# Altium footprint library AD.PcbLib: 13 footprints
Each footprint in its own frame and in the unit in brackets; x right, y up, seen from the top. Pads: shape width x height; smd on the part's side, far side on the other; paste and mask are expansions set on the pad; w line width, h text height; cw(c..) or ccw(c..) is an arc to the next point about the centre after c.
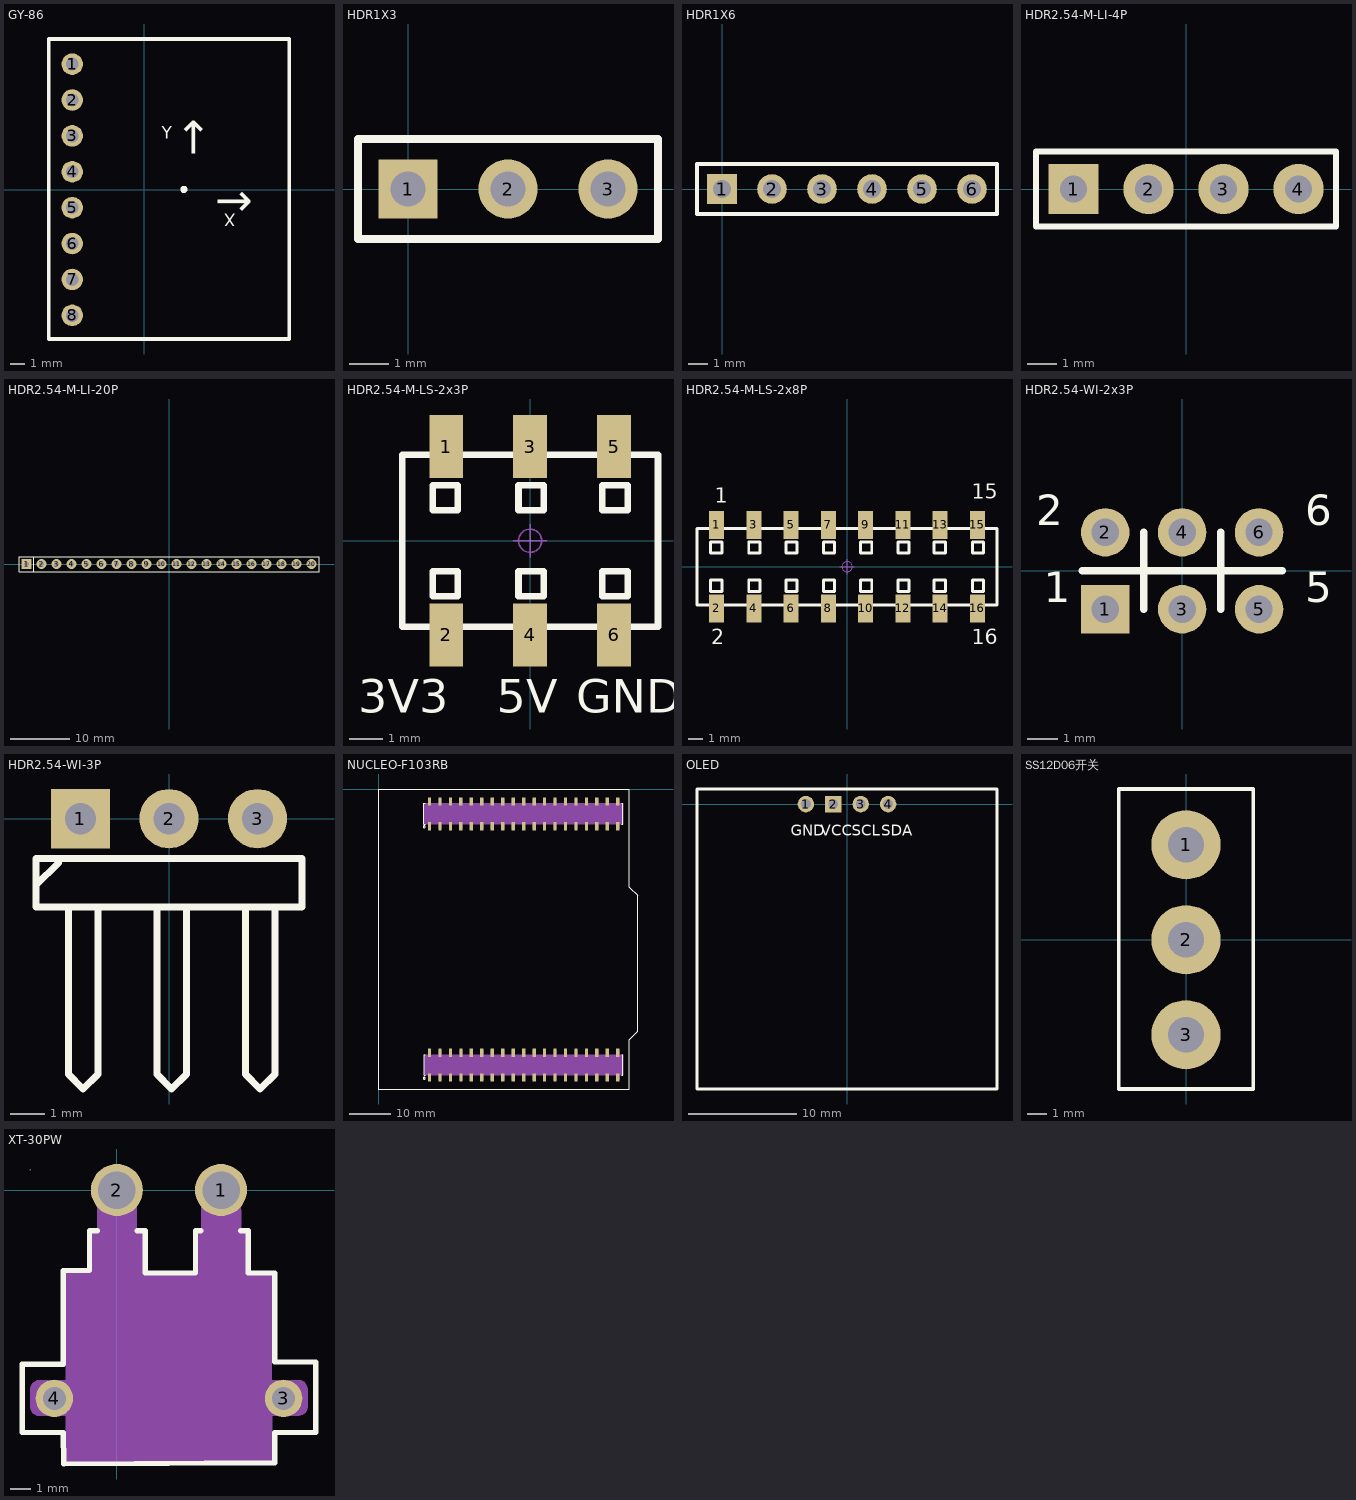
[diagram p0: the footprints below, top view; thin cyan lines are the x and y axes]

## GY-86 [mil]
pads (8):
  round 60 hole 36: 1(-200,350) 2(-200,250) 3(-200,150) 4(-200,50) 5(-200,-50) 6(-200,-150) 7(-200,-250) 8(-200,-350)
Top Overlay:
  circle w10: c111,1 r5
  lines w10: 404.29,420 404.29,-415.98 -265,-415.98 -265,420.01 404.29,420 ; 404.29,420 404.29,420
  text "↑" at 175.05,19.78 h157.48
  text "X" at 255.05,-54 h59.05
  text "↑" at 85.05,69.78 h157.48
  text "Y" at 50.05,129.78 h59.05

## HDR1X3 [mm] "Connector; Header; 3 Position"
pads (3):
  rect 1.5x1.5 hole 0.9: 1(0,0)
  round 1.5 hole 0.9: 2(2.54,0) 3(5.08,0)
Top Overlay:
  lines w0.2: -1.27,-1.27 6.35,-1.27 6.35,1.27 -1.27,1.27 -1.27,-1.27
3D body "HDR2.54-1P_M.STEP": height 8.5, standoff -3, extent 3.81,-1.27 6.35,1.27
3D body "HDR2.54-1P_M.STEP": height 8.5, standoff -3, extent 1.27,-1.27 3.81,1.27
3D body "HDR2.54-1P_M.STEP": height 8.5, standoff -3, extent -1.27,-1.27 1.27,1.27

## HDR1X6 [mm] "Connector; Header; 6 Position"
pads (6):
  rect 1.5x1.5 hole 0.9: 1(0,0)
  round 1.5 hole 0.9: 2(2.54,0) 3(5.08,0) 4(7.62,0) 5(10.16,0) 6(12.7,0)
Top Overlay:
  lines w0.2: -1.27,-1.27 -1.27,1.27 13.97,1.27 13.97,-1.27 -1.27,-1.27
3D body "HDR2.54-1P_M.STEP": height 8.5, standoff -3, extent 11.43,-1.27 13.97,1.27
3D body "HDR2.54-1P_M.STEP": height 8.5, standoff -3, extent 8.89,-1.27 11.43,1.27
3D body "HDR2.54-1P_M.STEP": height 8.5, standoff -3, extent 6.35,-1.27 8.89,1.27
3D body "HDR2.54-1P_M.STEP": height 8.5, standoff -3, extent 3.81,-1.27 6.35,1.27
3D body "HDR2.54-1P_M.STEP": height 8.5, standoff -3, extent 1.27,-1.27 3.81,1.27
3D body "HDR2.54-1P_M.STEP": height 8.5, standoff -3, extent -1.27,-1.27 1.27,1.27

## HDR2.54-M-LI-4P [mm] "排母，4脚"
pads (4):
  rect 1.7x1.7 hole 0.9: 1(-3.81,0)
  round 1.7 hole 0.9: 2(-1.27,0) 3(1.27,0) 4(3.81,0)
Top Overlay:
  lines w0.2: -5.08,-1.27 5.08,-1.27 5.08,1.27 -5.08,1.27 -5.08,-1.27
3D body "HDR2.54-1P_M.STEP": height 8.5, standoff -3, extent 0,-1.27 2.54,1.27
3D body "HDR2.54-1P_M.STEP": height 8.5, standoff -3, extent 2.54,-1.27 5.08,1.27
3D body "HDR2.54-1P_M.STEP": height 8.5, standoff -3, extent -2.54,-1.27 0,1.27
3D body "HDR2.54-1P_M.STEP": height 8.5, standoff -3, extent -5.08,-1.27 -2.54,1.27

## HDR2.54-M-LI-20P [mm] "排母，20脚"
pads (20):
  rect 1.7x1.7 hole 0.9: 1(-24.13,0)
  round 1.7 hole 0.9: 2(-21.59,0) 3(-19.05,0) 4(-16.51,0) 5(-13.97,0) 6(-11.43,0) 7(-8.89,0) 8(-6.35,0) 9(-3.81,0) 10(-1.27,0) 11(1.27,0) 12(3.81,0) 13(6.35,0) 14(8.89,0) 15(11.43,0) 16(13.97,0)
  round 1.7 hole 0.762: 17(16.51,0) 18(19.05,0) 19(21.59,0) 20(24.13,0)
Top Overlay:
  lines w0.2: -22.88,-1.25 -22.88,1.25 ; -25.4,-1.27 25.4,-1.27 25.4,1.27 -23.495,1.27 -25.4,1.27 -25.4,-1.27
3D body "HDR2.54-1P_M.STEP": height 8.5, standoff -3, extent -15.24,-1.27 -12.7,1.27
3D body "HDR2.54-1P_M.STEP": height 8.5, standoff -3, extent -17.78,-1.27 -15.24,1.27
3D body "HDR2.54-1P_M.STEP": height 8.5, standoff -3, extent -20.32,-1.27 -17.78,1.27
3D body "HDR2.54-1P_M.STEP": height 8.5, standoff -3, extent -22.86,-1.27 -20.32,1.27
3D body "HDR2.54-1P_M.STEP": height 8.5, standoff -3, extent -25.4,-1.27 -22.86,1.27
3D body "HDR2.54-1P_M.STEP": height 8.5, standoff -3, extent -2.54,-1.27 0,1.27
3D body "HDR2.54-1P_M.STEP": height 8.5, standoff -3, extent -5.08,-1.27 -2.54,1.27
3D body "HDR2.54-1P_M.STEP": height 8.5, standoff -3, extent -7.62,-1.27 -5.08,1.27
3D body "HDR2.54-1P_M.STEP": height 8.5, standoff -3, extent -10.16,-1.27 -7.62,1.27
3D body "HDR2.54-1P_M.STEP": height 8.5, standoff -3, extent -12.7,-1.27 -10.16,1.27
3D body "HDR2.54-1P_M.STEP": height 8.5, standoff -3, extent 10.16,-1.27 12.7,1.27
3D body "HDR2.54-1P_M.STEP": height 8.5, standoff -3, extent 7.62,-1.27 10.16,1.27
3D body "HDR2.54-1P_M.STEP": height 8.5, standoff -3, extent 5.08,-1.27 7.62,1.27
3D body "HDR2.54-1P_M.STEP": height 8.5, standoff -3, extent 2.54,-1.27 5.08,1.27
3D body "HDR2.54-1P_M.STEP": height 8.5, standoff -3, extent 0,-1.27 2.54,1.27
3D body "HDR2.54-1P_M.STEP": height 8.5, standoff -3, extent 22.86,-1.27 25.4,1.27
3D body "HDR2.54-1P_M.STEP": height 8.5, standoff -3, extent 20.32,-1.27 22.86,1.27
3D body "HDR2.54-1P_M.STEP": height 8.5, standoff -3, extent 17.78,-1.27 20.32,1.27
3D body "HDR2.54-1P_M.STEP": height 8.5, standoff -3, extent 15.24,-1.27 17.78,1.27
3D body "HDR2.54-1P_M.STEP": height 8.5, standoff -3, extent 12.7,-1.27 15.24,1.27

## HDR2.54-M-LS-2x3P [mm] "脚距：2.54mm，贴片双排母"
pads (6):
  rect 1.02x1.9 smd: 1(-2.54,2.85) 2(-2.54,-2.85) 3(0,2.85) 4(0,-2.85) 5(2.54,2.85) 6(2.54,-2.85)
Top Overlay:
  lines w0.2: -3.87,-2.6 -3.87,2.6 3.87,2.6 3.87,-2.6 -3.87,-2.6 ; -2.951,-1.681 -2.951,-0.919 -2.189,-0.919 -2.189,-1.681 -2.951,-1.681 ; -2.951,0.919 -2.951,1.681 -2.189,1.681 -2.189,0.919 -2.951,0.919 ; -0.351,-1.681 -0.351,-0.919 0.411,-0.919 0.411,-1.681 -0.351,-1.681 ; -0.351,0.919 -0.351,1.681 0.411,1.681 0.411,0.919 -0.351,0.919 ; 2.189,-1.681 2.951,-1.681 2.951,-0.919 2.189,-0.919 2.189,-1.681 ; 2.189,0.919 2.951,0.919 2.951,1.681 2.189,1.681 2.189,0.919
  text "GND" at 1.397,-5.207 h1.02
  text "3V3" at -5.207,-5.207 h1.02
  text "5V" at -1.016,-5.207 h1.02
Top Courtyard:
  circle w0.05: c0,0 r0.35
  lines w0.05: -0.5,0 0.5,0 ; 0,-0.5 0,0.5
3D body "HDR2.54 2x1P_M.STEP": height 5.15, standoff 0, extent 1.24,-3.2 3.84,3.2
3D body "HDR2.54 2x1P_M.STEP": height 5.15, standoff 0, extent -1.3,-3.2 1.3,3.2
3D body "HDR2.54 2x1P_M.STEP": height 5.15, standoff 0, extent -3.84,-3.2 -1.24,3.2

## HDR2.54-M-LS-2x8P [mm] "脚距：2.54mm，贴片双排母"
pads (16):
  rect 1.02x1.9 smd: 1(-8.89,2.85) 2(-8.89,-2.85) 3(-6.35,2.85) 4(-6.35,-2.85) 5(-3.81,2.85) 6(-3.81,-2.85) 7(-1.27,2.85) 8(-1.27,-2.85) 9(1.27,2.85) 10(1.27,-2.85) 11(3.81,2.85) 12(3.81,-2.85) 13(6.35,2.85) 14(6.35,-2.85) 15(8.89,2.85) 16(8.89,-2.85)
Top Overlay:
  lines w0.2: -10.23,-2.6 10.22,-2.6 10.22,2.6 -10.23,2.6 -10.23,-2.6 ; -9.301,-1.681 -8.539,-1.681 -8.539,-0.919 -9.301,-0.919 -9.301,-1.681 ; -9.301,0.919 -8.539,0.919 -8.539,1.681 -9.301,1.681 -9.301,0.919 ; -6.701,-1.681 -5.939,-1.681 -5.939,-0.919 -6.701,-0.919 -6.701,-1.681 ; -6.701,0.919 -5.939,0.919 -5.939,1.681 -6.701,1.681 -6.701,0.919 ; -4.161,-1.681 -4.161,-0.919 -3.399,-0.919 -3.399,-1.681 -4.161,-1.681 ; -4.161,0.919 -4.161,1.681 -3.399,1.681 -3.399,0.919 -4.161,0.919 ; -1.621,-1.681 -0.859,-1.681 -0.859,-0.919 -1.621,-0.919 -1.621,-1.681 ; -1.621,0.919 -0.859,0.919 -0.859,1.681 -1.621,1.681 -1.621,0.919 ; 0.919,-1.681 1.681,-1.681 1.681,-0.919 0.919,-0.919 0.919,-1.681 ; 0.919,0.919 1.681,0.919 1.681,1.681 0.919,1.681 0.919,0.919 ; 3.459,-1.681 4.221,-1.681 4.221,-0.919 3.459,-0.919 3.459,-1.681 ; 3.459,0.919 4.221,0.919 4.221,1.681 3.459,1.681 3.459,0.919 ; 5.939,-1.681 5.939,-0.919 6.701,-0.919 6.701,-1.681 5.939,-1.681 ; 5.939,0.919 5.939,1.681 6.701,1.681 6.701,0.919 5.939,0.919 ; 8.539,-1.681 8.539,-0.919 9.301,-0.919 9.301,-1.681 8.539,-1.681 ; 8.539,0.919 8.539,1.681 9.301,1.681 9.301,0.919 8.539,0.919
  text "2" at -9.271,-5.278 h1.02
  text "1" at -9.017,4.374 h1.02
  text "15" at 8.509,4.628 h1.02
  text "16" at 8.509,-5.278 h1.02
Top Courtyard:
  circle w0.05: c0,0 r0.35
  lines w0.05: -0.5,0 0.5,0 ; 0,-0.5 0,0.5
3D body "HDR2.54 2x1P_M.STEP": height 5.15, standoff 0, extent 7.59,-3.2 10.19,3.2
3D body "HDR2.54 2x1P_M.STEP": height 5.15, standoff 0, extent 5.05,-3.2 7.65,3.2
3D body "HDR2.54 2x1P_M.STEP": height 5.15, standoff 0, extent 2.51,-3.2 5.11,3.2
3D body "HDR2.54 2x1P_M.STEP": height 5.15, standoff 0, extent -0.03,-3.2 2.57,3.2
3D body "HDR2.54 2x1P_M.STEP": height 5.15, standoff 0, extent -2.57,-3.2 0.03,3.2
3D body "HDR2.54 2x1P_M.STEP": height 5.15, standoff 0, extent -10.19,-3.2 -7.59,3.2
3D body "HDR2.54 2x1P_M.STEP": height 5.15, standoff 0, extent -7.65,-3.2 -5.05,3.2
3D body "HDR2.54 2x1P_M.STEP": height 5.15, standoff 0, extent -5.11,-3.2 -2.51,3.2

## HDR2.54-WI-2x3P [mm] "双排弯脚排针，3x2脚"
pads (6):
  rect 1.6x1.6 hole 0.9: 1(-2.54,-1.27)
  round 1.6 hole 0.9: 2(-2.54,1.27) 3(0,-1.27) 4(0,1.27) 5(2.54,-1.27) 6(2.54,1.27)
Top Overlay:
  lines w0.254: -3.302,0 3.302,0 ; -1.27,-1.27 -1.27,1.27 ; 1.27,-1.27 1.27,1.27
  text "6" at 4.064,1.503 h1.02
  text "5" at 4.064,-1.037 h1.02
  text "2" at -4.826,1.503 h1.02
  text "1" at -4.572,-1.037 h1.02
Bottom Overlay:
  lines w0.254: -3.302,0 3.302,0 ; -1.27,-1.27 -1.27,1.27 ; 1.27,-1.27 1.27,1.27
3D body "HDR-1x2_H.STEP": height 5.1, standoff -3, extent -1.27,-10.489 1.27,2.361
3D body "HDR-1x2_H.STEP": height 5.1, standoff -3, extent -3.81,-10.489 -1.27,2.361
3D body "HDR-1x2_H.STEP": height 5.1, standoff -3, extent 1.27,-10.489 3.81,2.361

## HDR2.54-WI-3P [mm] "弯脚排针，3脚"
pads (3):
  rect 1.7x1.7 hole 0.9: 1(-2.54,0)
  round 1.7 hole 0.9: 2(0,0) 3(2.54,0)
Top Overlay:
  lines w0.2: -3.81,-1.905 -3.175,-1.27 ; -2.888,-2.54 -2.888,-7.332 -2.465,-7.755 -2.041,-7.332 -2.032,-7.323 ; -2.041,-7.323 -2.041,-2.54 ; -0.348,-2.54 -0.348,-7.332 0.075,-7.755 0.499,-7.332 ; 0.499,-7.323 0.499,-2.54 ; 2.192,-2.54 2.192,-7.332 2.615,-7.755 3.039,-7.332 ; 3.039,-7.323 3.039,-2.54 ; -3.81,-2.54 3.81,-2.54 3.81,-1.143 -2.032,-1.143 -3.81,-1.143 -3.81,-2.54
3D body "HDR2.54-1P_H.STEP": height 4.85, standoff -3, extent -3.81,-7.77 -1.27,1.27
3D body "HDR2.54-1P_H.STEP": height 4.85, standoff -3, extent -1.27,-7.77 1.27,1.27
3D body "HDR2.54-1P_H.STEP": height 4.85, standoff -3, extent 1.27,-7.77 3.81,1.27

## NUCLEO-F103RB [mm]
pads (76):
  rect 0.8x2 smd paste+0 mask+0.051: 1(12.366,-70.045) 2(12.366,-64.045) 3(14.906,-70.045) 4(14.906,-64.045) 5(17.446,-70.045) 6(17.446,-64.045) 7(19.986,-70.045) 8(19.986,-64.045) 9(22.526,-70.045) 10(22.526,-64.045) 11(25.066,-70.045) 12(25.066,-64.045) 13(27.606,-70.045) 14(27.606,-64.045) 15(30.146,-70.045) 16(30.146,-64.045) 17(32.686,-70.045) 18(32.686,-64.045) 19(35.226,-70.045) 20(35.226,-64.045) 21(37.766,-70.045) 22(37.766,-64.045) 23(40.306,-70.045) 24(40.306,-64.045) 25(42.846,-70.045) 26(42.846,-64.045) 27(45.386,-70.045) 28(45.386,-64.045) 29(47.926,-70.045) 30(47.926,-64.045) 31(50.466,-70.045) 32(50.466,-64.045) 33(53.006,-70.045) 34(53.006,-64.045) 35(55.546,-70.045) 36(55.546,-64.045) 37(58.086,-70.045) 38(58.086,-64.045) 73(12.361,-9.019) 74(12.361,-3.019) 75(14.901,-9.019) 76(14.901,-3.019) 77(17.441,-9.019) 78(17.441,-3.019) 79(19.981,-9.019) 80(19.981,-3.019) 81(22.521,-9.019) 82(22.521,-3.019) 83(25.061,-9.019) 84(25.061,-3.019) 85(27.601,-9.019) 86(27.601,-3.019) 87(30.141,-9.019) 88(30.141,-3.019) 89(32.681,-9.019) 90(32.681,-3.019) 91(35.221,-9.019) 92(35.221,-3.019) 93(37.761,-9.019) 94(37.761,-3.019) 95(40.301,-9.019) 96(40.301,-3.019) 97(42.841,-9.019) 98(42.841,-3.019) 99(45.381,-9.019) 100(45.381,-3.019) 101(47.921,-9.019) 102(47.921,-3.019) 103(50.461,-9.019) 104(50.461,-3.019) 105(53.001,-9.019) 106(53.001,-3.019) 107(55.541,-9.019) 108(55.541,-3.019) 109(58.081,-9.019) 110(58.081,-3.019)
Top Overlay:
  circle w0.254: c11.091,-9.193 r0.231
  circle w0.254: c11.096,-70.22 r0.231
  lines w0.254: 11.283,-3.519 11.021,-3.519 11.021,-8.519 11.309,-8.519 ; 11.328,-64.545 11.026,-64.545 11.026,-69.545 11.354,-69.545 ; 59.03,-69.545 59.326,-69.545 59.326,-64.545 59.055,-64.545 ; 59.086,-8.519 59.321,-8.519 59.321,-3.519 59.086,-3.519 ; 62.866,-25.845 62.866,-58.845 60.866,-60.845 60.866,-72.845 -0.025,-72.845 -0.025,0 60.866,0 60.866,-23.845 62.866,-25.845 ; 62.866,-25.845 62.866,-26.045 62.866,-25.845
Mechanical 7:
  region: 11.091,-8.519 11.091,-3.519 59.351,-3.519 59.351,-8.519
  region: 11.096,-69.545 11.096,-64.545 59.356,-64.545 59.356,-69.545
Mechanical 8:
  region: 11.126,-70.615 11.126,-70.627 11.108,-70.645 11.083,-70.645 11.066,-70.627 11.066,-70.615 11.066,-70.602 11.083,-70.585 11.108,-70.585 11.126,-70.602 11.126,-70.615
Top Assembly:
  drawing of 95 lines, arcs and shapes, not listed

## OLED [mil]
pads (4):
  round 60 hole 35.98: 1(-150,0) 3(50,0) 4(150,0)
  rect 60x60 hole 35.98: 2(-50,0)
Top Overlay:
  lines w10: -547.24,-1039.37 547.24,-1039.37 547.24,55.12 -547.24,55.12 -547.24,-1039.37
  text "SDA" at 125,-115.9 h39.37
  text "SCL" at 17.87,-115.9 h39.37
  text "VCC" at -95.37,-115.9 h39.37
  text "GND" at -205,-115.9 h39.37

## SS12D06开关 [mm]
pads (3):
  round 3.5 hole 1.8 paste-2539.97 mask+0.102: 1(0,4.8) 2(0,0) 3(0,-4.8)
Top Overlay:
  lines w0.2: -3.4,-7.544 3.4,-7.544 3.4,7.62 -3.4,7.62 -3.4,-7.544

## XT-30PW [mm]
pads (4):
  round 2.5 hole 1.8 paste-2539.97 mask+0.051: 1(5,0) 2(0,0)
  round 1.8 hole 1.1 paste-2539.97 mask+0.051: 3(8,-10) 4(-3,-10)
Top Overlay:
  lines w0.254: -0.929,-1.952 -1.31,-1.952 -1.31,-3.857 -2.58,-3.857 -2.58,-4.953 -2.58,-8.357 -4.547,-8.357 -4.547,-11.633 -2.577,-11.633 -2.55,-13.15 7.58,-13.091 7.58,-11.633 9.55,-11.633 9.55,-8.255 7.58,-8.255 7.58,-4.953 7.58,-3.984 6.31,-3.984 6.31,-1.952 5.929,-1.952 ; 0.976,-1.952 1.357,-1.952 1.357,-3.984 3.77,-3.984 3.77,-1.952 4.024,-1.952
Mechanical 7:
  region: -0.805,0.543 -0.687,0.665 -0.584,0.774 -0.447,0.858 -0.31,0.919 -0.165,0.963 0.011,0.97 0.152,0.959 0.305,0.919 0.454,0.856 0.586,0.769 0.697,0.66 0.805,0.535 0.873,0.391 0.92,0.246 0.952,0.098 0.95,-1.981 1.251,-1.981 1.25,-3.982 3.756,-3.979 3.751,-1.981 4.053,-1.978 4.048,0.092 4.08,0.255 4.131,0.405 4.202,0.543 4.299,0.659 4.421,0.772 4.552,0.859 4.682,0.919 4.838,0.96 4.989,0.971 5.16,0.961 5.315,0.917 5.447,0.861 5.577,0.769 5.706,0.656 5.8,0.54 5.867,0.403 5.919,0.257 5.952,0.104 5.959,-1.978 6.24,-1.982 6.252,-3.983 7.45,-3.977 7.441,-9.132 8.843,-9.139 8.948,-9.176 8.992,-9.214 9.07,-9.298 9.144,-9.43 9.158,-9.549 9.151,-10.419 9.143,-10.51 9.111,-10.601 9.054,-10.686 8.993,-10.75 8.915,-10.793 8.833,-10.82 8.75,-10.833 7.448,-10.832 7.453,-13.047 -2.44,-13.05 -2.454,-10.826 -3.751,-10.83 -3.845,-10.823 -3.929,-10.788 -4.007,-10.736 -4.065,-10.683 -4.114,-10.592 -4.141,-10.518 -4.148,-10.44 -4.154,-9.515 -4.138,-9.442 -4.11,-9.358 -4.061,-9.275 -4.001,-9.217 -3.914,-9.166 -3.835,-9.135 -2.448,-9.129 -2.455,-3.975 -1.241,-3.98 -1.248,-1.98 -0.951,-1.983 -0.951,0.092 -0.92,0.253 -0.871,0.397 -0.851,0.436 -0.851,0.437
Mechanical 8:
  region: -4.124,0.971 -4.124,0.959 -4.142,0.941 -4.166,0.941 -4.184,0.959 -4.184,0.971 -4.184,0.984 -4.166,1.001 -4.142,1.001 -4.124,0.984 -4.124,0.971
Bottom Assembly:
  region: 0.325,0 0.325,-0.065 0.276,-0.184 0.184,-0.276 0.065,-0.325 -0.065,-0.325 -0.184,-0.276 -0.276,-0.184 -0.325,-0.065 -0.325,0 -0.325,0.065 -0.276,0.184 -0.184,0.276 -0.065,0.325 0.065,0.325 0.184,0.276 0.276,0.184 0.325,0.065 0.325,0
  region: 5.325,0 5.325,-0.065 5.276,-0.184 5.184,-0.276 5.065,-0.325 4.935,-0.325 4.816,-0.276 4.724,-0.184 4.675,-0.065 4.675,0 4.675,0.065 4.724,0.184 4.816,0.276 4.935,0.325 5.065,0.325 5.184,0.276 5.276,0.184 5.325,0.065 5.325,0
  region: -2.813,-10 -2.813,-10.037 -2.841,-10.106 -2.894,-10.159 -2.963,-10.187 -3.037,-10.187 -3.106,-10.159 -3.159,-10.106 -3.187,-10.037 -3.187,-10 -3.187,-9.963 -3.159,-9.894 -3.106,-9.841 -3.037,-9.813 -2.963,-9.813 -2.894,-9.841 -2.841,-9.894 -2.813,-9.963 -2.813,-10
  region: 8.187,-10 8.187,-10.037 8.159,-10.106 8.106,-10.159 8.037,-10.187 7.963,-10.187 7.894,-10.159 7.841,-10.106 7.813,-10.037 7.813,-10 7.813,-9.963 7.841,-9.894 7.894,-9.841 7.963,-9.813 8.037,-9.813 8.106,-9.841 8.159,-9.894 8.187,-9.963 8.187,-10